# Altium schematic symbol library UM1750S-00.SchLib: 1 symbol
Pins are listed as number, name and electrical type; pins without a type are passive.

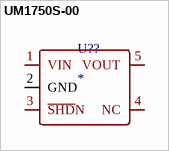
[diagram p0: symbol UM1750S-00]

## UM1750S-00
designator U??
footprint SOT-23-5
pins: 1 VIN, 2 GND, 3 ~{SHD}N, 4 NC, 5 VOUT